# Altium schematic symbol library macropad.SchLib: 3 symbols
Pins are listed as number, name and electrical type; pins without a type are passive.

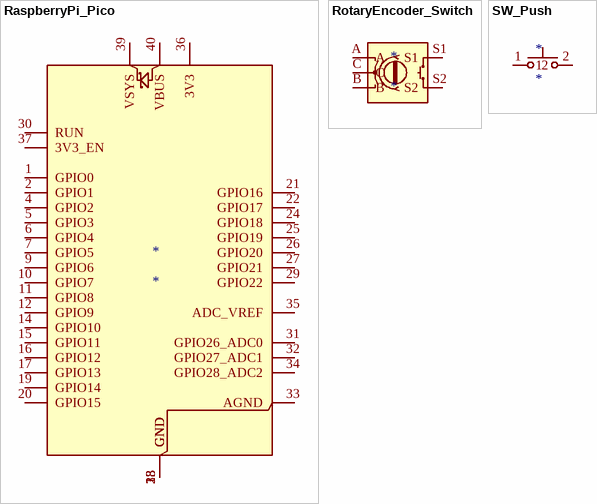
[diagram p0: symbols RaspberryPi_Pico to SW_Push]

## RaspberryPi_Pico
designator *
pins: 1 GPIO0, 2 GPIO1, 3 GND, 4 GPIO2, 5 GPIO3, 6 GPIO4, 7 GPIO5, 8 GND, 9 GPIO6, 10 GPIO7, 11 GPIO8, 12 GPIO9, 13 GND, 14 GPIO10, 15 GPIO11, 16 GPIO12, 17 GPIO13, 18 GND, 19 GPIO14, 20 GPIO15, 21 GPIO16, 22 GPIO17, 23 GND, 24 GPIO18, 25 GPIO19, 26 GPIO20, 27 GPIO21, 28 GND, 29 GPIO22, 30 RUN, 31 GPIO26_ADC0, 32 GPIO27_ADC1, 33 AGND, 34 GPIO28_ADC2, 35 ADC_VREF, 36 3V3, 37 3V3_EN, 38 GND, 39 VSYS, 40 VBUS

## RotaryEncoder_Switch
designator *
pins: A, B, C, S1, S2

## SW_Push
designator *
pins: 1, 2